# Altium footprint library HFPB_01-PCBLib.PcbLib: 102 footprints (part 7 of 7)
Each footprint in its own frame and in the unit in brackets; x right, y up, seen from the top. Pads: shape width x height; smd on the part's side, far side on the other; paste and mask are expansions set on the pad; w line width, h text height; cw(c..) or ccw(c..) is an arc to the next point about the centre after c.
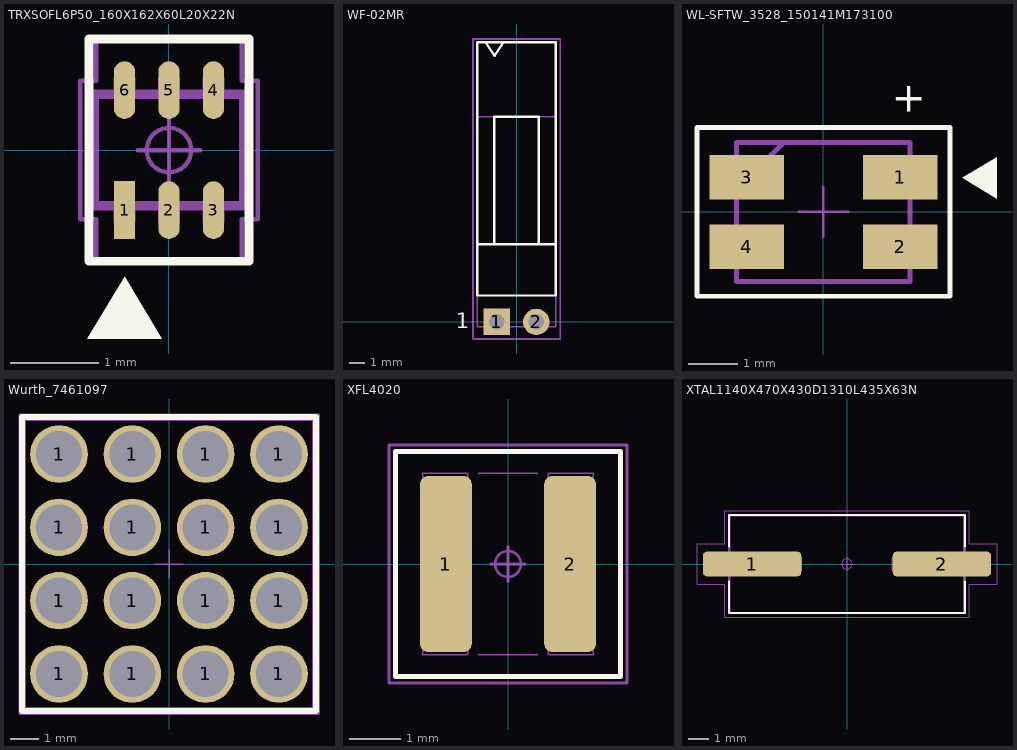
[diagram p6: the footprints below, top view; thin cyan lines are the x and y axes]

## TRXSOFL6P50_160X162X60L20X22N [mm] "Transistor, Small Outline Flat Lead (SOFL), 0.50 mm pitch; 6 pin, 1.60 mm L X 1.175 mm W X 0.60 mm H body"
height 0.6
pads (6):
  rect 0.24x0.65 smd: 1(-0.5,-0.675)
  oval 0.24x0.65 smd: 2(0,-0.675) 3(0.5,-0.675) 4(0.5,0.675) 5(0,0.675) 6(-0.5,0.675)
Top Overlay:
  region: -0.92,-2.125 -0.08,-2.125 -0.5,-1.425
  lines w0.1: -0.9,-1.25 -0.9,1.25 0.9,1.25 0.9,-1.25 -0.9,-1.25
Mechanical 11:
  lines w0.1: -0.85,-0.63 -0.85,0.63 0.85,0.63 0.85,-0.63 -0.85,-0.63
Mechanical 12:
  lines w0.025: -0.8,-0.587 -0.8,0.587 0.8,0.587 0.8,-0.587 -0.8,-0.587 ; -0.613,-0.813 -0.387,-0.813 -0.387,-0.613 -0.613,-0.613 -0.613,-0.813 ; -0.613,0.613 -0.387,0.613 -0.387,0.813 -0.613,0.813 -0.613,0.613 ; -0.112,-0.813 0.112,-0.813 0.112,-0.613 -0.112,-0.613 -0.112,-0.813 ; -0.112,0.613 0.112,0.613 0.112,0.813 -0.112,0.813 -0.112,0.613 ; 0.387,-0.813 0.613,-0.813 0.613,-0.613 0.387,-0.613 0.387,-0.813 ; 0.387,0.613 0.613,0.613 0.613,0.813 0.387,0.813 0.387,0.613
Mechanical 15:
  circle w0.05: c0,0 r0.25
  lines w0.05: -0.35,0 0.35,0 ; 0,-0.35 0,0.35 ; -1,-0.78 -1,0.78 -0.82,0.78 -0.82,1.25 0.82,1.25 0.82,0.78 1,0.78 1,-0.78 0.82,-0.78 0.82,-1.25 -0.82,-1.25 -0.82,-0.78 -1,-0.78
Mechanical 16:
  text ".Designator" at -1,1.5 h1.2
3D body "TRXSOFL6P50_160X162X60L20X22.STEP": height 0.6, standoff 0, extent -0.8,-0.813 0.8,0.813

## WF-02MR [mm] "Male  Pitch=2.54mm"
height 5.8
pads (2):
  rect 1.7x1.7 hole 1 paste-1: 1(-1.27,0)
  round 1.7 hole 1 paste-1: 2(1.27,0)
Top Overlay:
  lines w0.15: -2.53,5 2.53,5 ; -1.985,18 -1.41,17.125 -0.835,18 ; -1.43,5 -1.43,13.2 1.43,13.2 1.43,5 ; -2.53,1.7 2.53,1.7 2.53,18 -2.53,18 -2.53,1.7
  text "1" at -3.9,-0.4 h1
Mechanical 13:
  lines w0.1: -2.53,-0.3 -2.53,13.2 2.53,13.2 2.53,-0.3 -2.53,-0.3
Mechanical 15:
  lines w0.1: -2.8,-1.1 -2.8,18.2 2.8,18.2 2.8,-1.1 -2.8,-1.1
3D body "WF-2R - 61900211021_Download_STP_61900211021_rev1.stp": height 5.9, standoff -3.3, extent -2.54,-0.3 2.54,13.22

## WL-SFTW_3528_150141M173100 [mm] "SMT Full-color TOP LED Waterclear, body 3.5x2.8mm"
height 2.1
pads (4):
  rect 1.5x0.9 smd: 1(1.55,0.7) 2(1.55,-0.7) 3(-1.55,0.7) 4(-1.55,-0.7)
Top Overlay:
  region: 3.5,0.265 3.5,1.105 2.8,0.685
  lines w0.1: -2.55,-1.7 2.55,-1.7 2.55,1.7 -2.55,1.7 -2.55,-1.7
  text "+" at 1.375,2.025 h0.6
Mechanical 13:
  lines w0.1: -1.75,0.45 -0.8,1.4 ; -1.75,-1.4 1.75,-1.4 1.75,1.4 -1.75,1.4 -1.75,-1.4
Mechanical 15:
  lines w0.05: -0.5,0 0.5,0 ; 0,-0.5 0,0.5 ; -2.55,-1.7 -2.55,1.7 2.55,1.7 2.55,-1.7 -2.55,-1.7
3D body "150141M173100_Download_STEP_150141M173100_rev1+.stp": height 1.9, standoff 0, extent -1.75,-1.4 1.75,1.4

## Wurth_7461097 [mm] "M6, blind 6.5mm"
height 10.5
pads (16):
  round 2 hole 1.6: 1(-3.81,-3.81) 1(-3.81,-1.27) 1(-3.81,1.27) 1(-3.81,3.81) 1(-1.27,-3.81) 1(-1.27,-1.27) 1(-1.27,1.27) 1(-1.27,3.81) 1(1.27,-3.81) 1(1.27,-1.27) 1(1.27,1.27) 1(1.27,3.81) 1(3.81,-3.81) 1(3.81,-1.27) 1(3.81,1.27) 1(3.81,3.81)
Top Overlay:
  lines w0.2: -5.1,-5.1 -5.1,5.1 5.1,5.1 5.1,-5.1 -5.1,-5.1
Mechanical 13:
  lines w0.1: -5,-5 5,-5 5,5 -5,5 -5,-5
Mechanical 15:
  lines w0.05: -0.5,0 0.5,0 ; 0,-0.5 0,0.5 ; -5.2,-5.2 5.2,-5.2 5.2,5.2 -5.2,5.2 -5.2,-5.2
3D body "7461097.stp": height 10.5, standoff -3.5, extent -5,-5 5,5

## XFL4020 [mm] "Inductor, Chip; 4.0 mm L X 4.0 mm W X 2.1 mm H body"
height 2.1
pads (2):
  rrect30% 1x3.4 smd: 1(-1.2,0) 2(1.2,0)
Top Overlay:
  lines w0.1: -2.175,-2.175 2.175,-2.175 2.175,2.175 -2.175,2.175 -2.175,-2.175
Mechanical 11:
  lines w0.1: -2.175,-2.175 2.175,-2.175 2.175,2.175 -2.175,2.175 -2.175,-2.175
Mechanical 12:
  lines w0.025: -0.575,-1.75 0.575,-1.75 ; -0.575,1.75 0.575,1.75 ; -1.65,-1.75 -0.775,-1.75 -0.775,1.75 -1.65,1.75 -1.65,-1.75 ; 0.775,-1.75 0.775,1.75 1.65,1.75 1.65,-1.75 0.775,-1.75
Mechanical 15:
  circle w0.05: c0,0 r0.25
  lines w0.05: -0.335,0 0.335,0 ; 0,-0.335 0,0.335 ; -2.3,-2.3 2.3,-2.3 2.3,2.3 -2.3,2.3 -2.3,-2.3
Mechanical 16:
  text ".Designator" at 0.85,0.8 h1.2
3D body "User Library-XFL4020.STEP": height 2.1, standoff 0, extent -2.15,-2.15 2.15,2.15

## XTAL1140X470X430D1310L435X63N [mm] "Crystal; 11.40 mm L X 4.70 mm W X 4.30 mm H body"
height 4.3
pads (2):
  rrect32% 4.8x1.2 smd: 1(-4.63,0) 2(4.63,0)
Top Overlay:
  lines w0.1: -5.75,-0.85 -5.75,-2.4 5.75,-2.4 5.75,-0.85 ; -5.75,0.85 -5.75,2.4 5.75,2.4 5.75,0.85
Mechanical 11:
  lines w0.1: -5.75,-2.4 5.75,-2.4 5.75,2.4 -5.75,2.4 -5.75,-2.4
Mechanical 12:
  lines w0.025: -6.55,-0.315 -6.55,0.315 -2.2,0.315 -2.2,-0.315 -6.55,-0.315 ; -5.7,-2.35 5.7,-2.35 5.7,2.35 -5.7,2.35 -5.7,-2.35 ; 2.2,-0.315 6.55,-0.315 6.55,0.315 2.2,0.315 2.2,-0.315
Mechanical 15:
  circle w0.05: c0,0 r0.25
  lines w0.05: -0.35,0 0.35,0 ; 0,-0.35 0,0.35 ; -7.315,-0.985 -5.95,-0.985 -5.95,-2.6 5.95,-2.6 5.95,-0.985 7.315,-0.985 7.315,0.985 5.95,0.985 5.95,2.6 -5.95,2.6 -5.95,0.985 -7.315,0.985 -7.315,-0.985
Mechanical 16:
  text ".Designator" at 0,0 h1.2
3D body "XTAL1140X470X430D1310L435X63.STEP": height 4.3, standoff 0, extent -6.55,-2.35 6.55,2.35